# EAGLE library part DF37NC-30DS-0.4V(51) (library DF37NC-30DS-0.4V_51_)
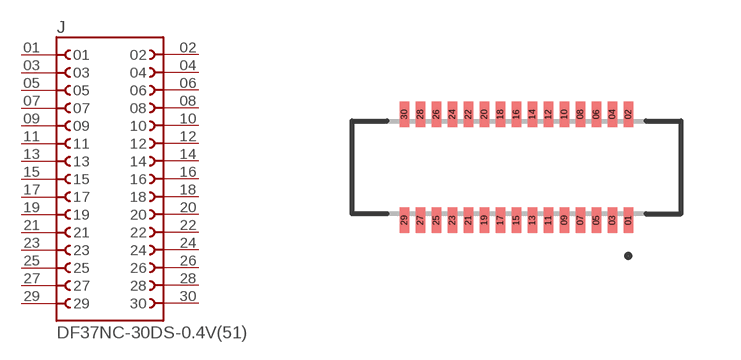
[diagram p0: symbol with the pads of HRS_DF37NC-30DS-0.4V(51); footprint HRS_DF37NC-30DS-0.4V(51)]

Designator prefix J

## DF37NC-30DS-0.4V(51) (DATASHEET_URL: https://s3.amazonaws.com/snapeda/datasheet/DF37NC-30DS-04V-51-_Hirose.pdf; DESCRIPTION: 30 Position Connector Receptacle, Center Strip Contacts Surface Mount Gold; MANUFACTURER: Hirose; MAXIMUM_PACKAGE_HEIGHT: 1.08mm; MPN: DF37NC-30DS-0.4V(51); PARTREV: 11.02.09; SOURCE_URL: https://www.snapeda.com/parts/DF37NC-30DS-0.4V(51)/Hirose/view-part/; STANDARD: Manufacturer Recommendations)  [HRS_DF37NC-30DS-0.4V(51)]
01  01  pas
02  02  pas
03  03  pas
04  04  pas
05  05  pas
06  06  pas
07  07  pas
08  08  pas
09  09  pas
10  10  pas
11  11  pas
12  12  pas
13  13  pas
14  14  pas
15  15  pas
16  16  pas
17  17  pas
18  18  pas
19  19  pas
20  20  pas
21  21  pas
22  22  pas
23  23  pas
24  24  pas
25  25  pas
26  26  pas
27  27  pas
28  28  pas
29  29  pas
30  30  pas

## Footprint HRS_DF37NC-30DS-0.4V(51) (pad centres in mm)
smd 0.23 x 0.63: 01 2.8,-1.325; 02 2.8,1.325; 03 2.4,-1.325; 04 2.4,1.325; 05 2,-1.325; 06 2,1.325; 07 1.6,-1.325; 08 1.6,1.325; 09 1.2,-1.325; 10 1.2,1.325; 11 0.8,-1.325; 12 0.8,1.325; 13 0.4,-1.325; 14 0.4,1.325; 15 0,-1.325; 16 0,1.325; 17 -0.4,-1.325; 18 -0.4,1.325; 19 -0.8,-1.325; 20 -0.8,1.325; 21 -1.2,-1.325; 22 -1.2,1.325; 23 -1.6,-1.325; 24 -1.6,1.325; 25 -2,-1.325; 26 -2,1.325; 27 -2.4,-1.325; 28 -2.4,1.325; 29 -2.8,-1.325; 30 -2.8,1.325